# Altium schematic symbol library DFE322520FD-4R7M=P2.SchLib: 1 symbol
Pins are listed as number, name and electrical type; pins without a type are passive.

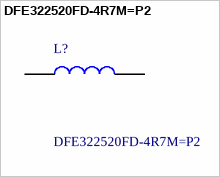
[diagram p0: symbol DFE322520FD-4R7M=P2]

## DFE322520FD-4R7M=P2
designator L?
DFE322520F_D Series Inductor 4.7uH +/-20% 1210 (3225); Manufacturer_Name: Murata Electronics; Geometry.Height: 2mm; Mouser Part Number: 81-DFE322520FD4R7MP2; Mouser Price/Stock: https://www.mouser.co.uk/ProductDetail/Murata-Electronics/DFE322520FD-4R7M%3dP2?qs=17u8i%2FzlE8%252BgAY54mivQ1g%3D%3D; Manufacturer_Part_Number: DFE322520FD-4R7M=P2; Datasheet Link: https://search.murata.co.jp/Ceramy/image/img/P02/J(E)TE243A-9104.pdf
footprint DFE322520FD1R0MP2
pins: 1, 2